# Altium footprint library FootPrintLib_11.PcbLib: 376 footprints (part 23 of 24)
Each footprint in its own frame and in the unit in brackets; x right, y up, seen from the top. Pads: shape width x height; smd on the part's side, far side on the other; paste and mask are expansions set on the pad; w line width, h text height; cw(c..) or ccw(c..) is an arc to the next point about the centre after c.
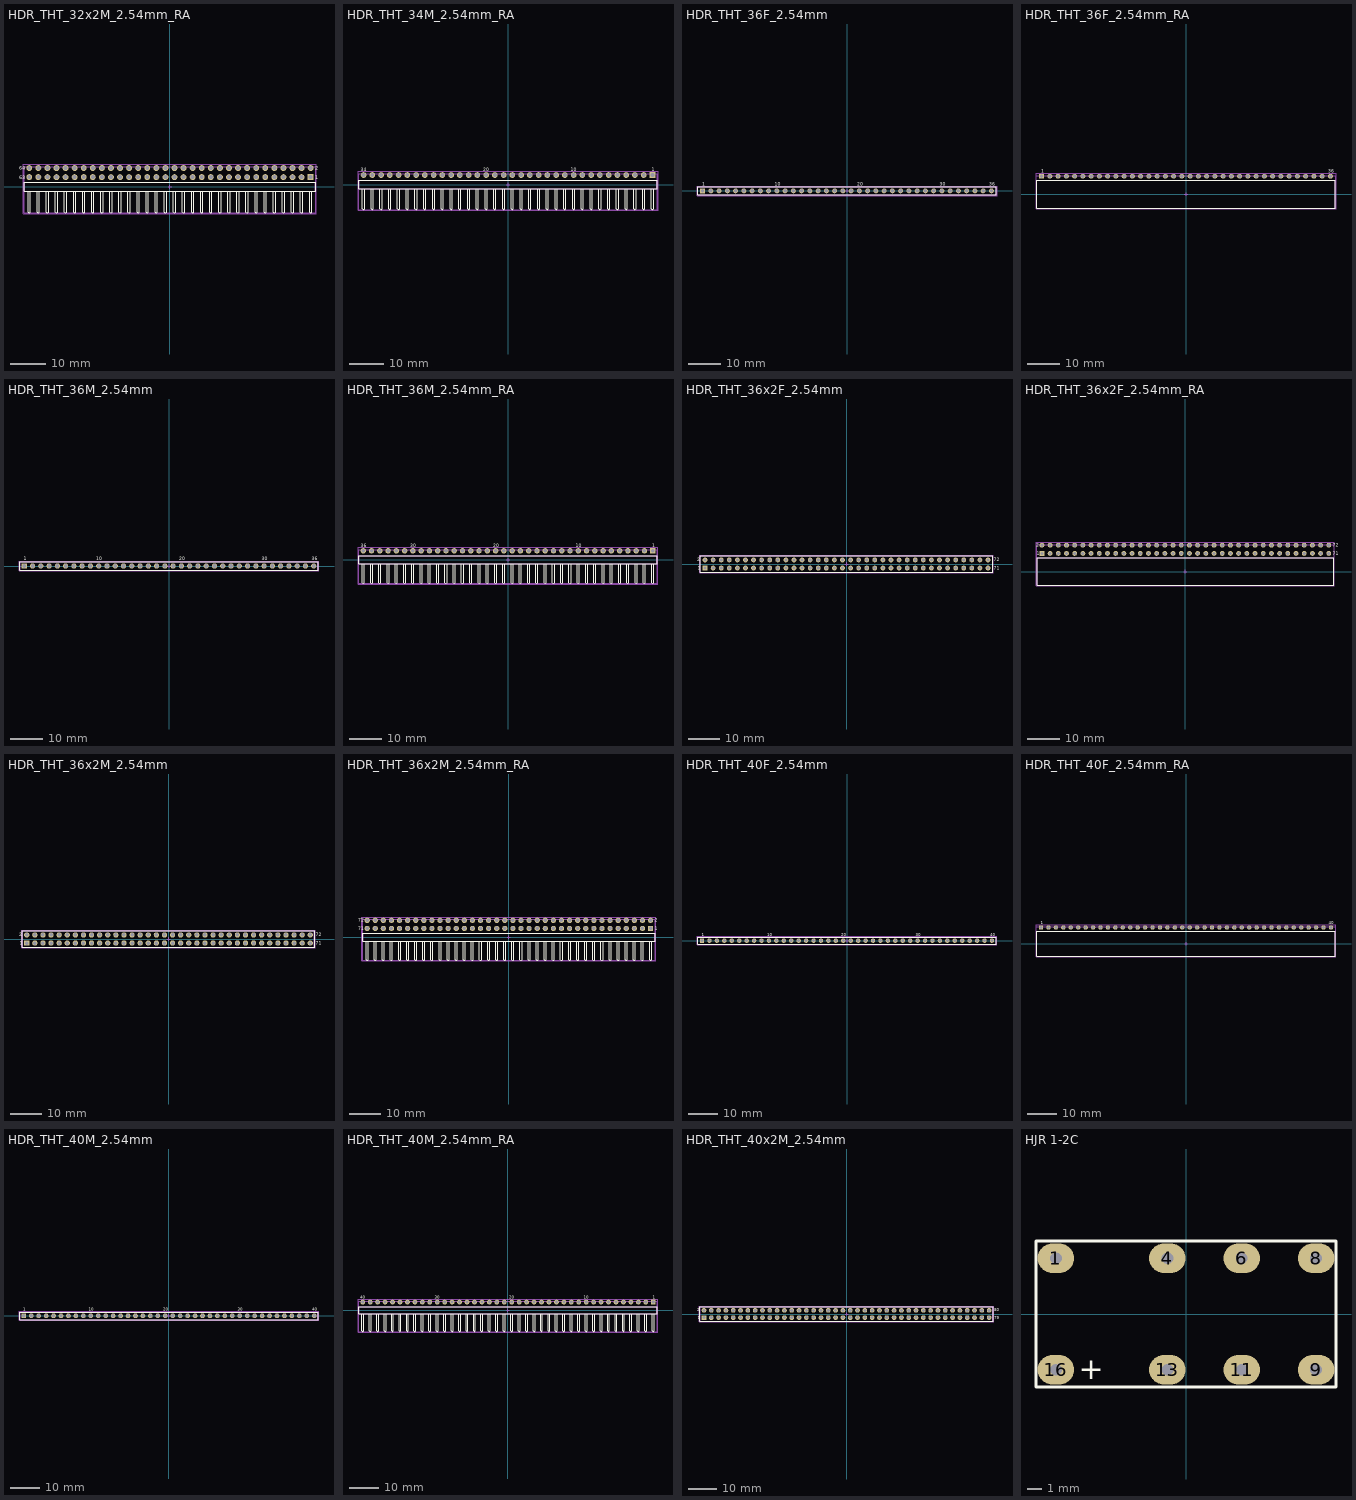
[diagram p22: the footprints below, top view; thin cyan lines are the x and y axes]

## HDR_THT_32x2M_2.54mm_RA [mm] "Pin Header, pitch 2.54 mm, THT, Angled, dual row, 64p"
height 5.08
pads (64):
  rect 1.65x1.65 hole 1.1: 1(39.37,2.73)
  round 1.65 hole 1.1: 2(39.37,5.27) 3(36.83,2.73) 4(36.83,5.27) 5(34.29,2.73) 6(34.29,5.27) 7(31.75,2.73) 8(31.75,5.27) 9(29.21,2.73) 10(29.21,5.27) 11(26.67,2.73) 12(26.67,5.27) 13(24.13,2.73) 14(24.13,5.27) 15(21.59,2.73) 16(21.59,5.27) 17(19.05,2.73) 18(19.05,5.27) 19(16.51,2.73) 20(16.51,5.27) 21(13.97,2.73) 22(13.97,5.27) 23(11.43,2.73) 24(11.43,5.27) 25(8.89,2.73) 26(8.89,5.27) 27(6.35,2.73) 28(6.35,5.27) 29(3.81,2.73) 30(3.81,5.27) 31(1.27,2.73) 32(1.27,5.27) 33(-1.27,2.73) 34(-1.27,5.27) 35(-3.81,2.73) 36(-3.81,5.27) 37(-6.35,2.73) 38(-6.35,5.27) 39(-8.89,2.73) 40(-8.89,5.27) 41(-11.43,2.73) 42(-11.43,5.27) 43(-13.97,2.73) 44(-13.97,5.27) 45(-16.51,2.73) 46(-16.51,5.27) 47(-19.05,2.73) 48(-19.05,5.27) 49(-21.59,2.73) 50(-21.59,5.27) 51(-24.13,2.73) 52(-24.13,5.27) 53(-26.67,2.73) 54(-26.67,5.27) 55(-29.21,2.73) 56(-29.21,5.27) 57(-31.75,2.73) 58(-31.75,5.27) 59(-34.29,2.73) 60(-34.29,5.27) 61(-36.83,2.73) 62(-36.83,5.27) 63(-39.37,2.73) 64(-39.37,5.27)
Top Overlay:
  drawing of 164 lines, arcs and shapes, not listed
  text "1" at 40.7,2.2 h1
  text "2" at 40.7,4.8 h1
  text "63" at -42.24,2.2 h1
  text "64" at -42.24,4.8 h1
Mechanical 11:
  lines w0.1: -40.64,-1.27 -40.64,1.27 40.64,1.27 40.64,-1.27 -40.64,-1.27
Mechanical 13:
  lines w0.1: -40.79,-7.27 40.79,-7.27 40.79,5.63 -40.79,5.63 -40.79,-7.27
Mechanical 15:
  lines w0.1: -0.5,0 0.5,0 ; 0,-0.5 0,0.5 ; -40.99,-7.47 40.99,-7.47 40.99,6.295 -40.99,6.295 -40.99,-7.47
3D body "61306421021.stp": height 5.14, standoff -2.94, extent -40.64,-7.27 40.64,5.63

## HDR_THT_34M_2.54mm_RA [mm] "Pin Header, pitch 2.54 mm, THT, Angled, single row, 34p"
height 2.54
pads (34):
  rect 1.65x1.65 hole 1.1: 1(41.91,2.77)
  round 1.65 hole 1.1: 2(39.37,2.77) 3(36.83,2.77) 4(34.29,2.77) 5(31.75,2.77) 6(29.21,2.77) 7(26.67,2.77) 8(24.13,2.77) 9(21.59,2.77) 10(19.05,2.77) 11(16.51,2.77) 12(13.97,2.77) 13(11.43,2.77) 14(8.89,2.77) 15(6.35,2.77) 16(3.81,2.77) 17(1.27,2.77) 18(-1.27,2.77) 19(-3.81,2.77) 20(-6.35,2.77) 21(-8.89,2.77) 22(-11.43,2.77) 23(-13.97,2.77) 24(-16.51,2.77) 25(-19.05,2.77) 26(-21.59,2.77) 27(-24.13,2.77) 28(-26.67,2.77) 29(-29.21,2.77) 30(-31.75,2.77) 31(-34.29,2.77) 32(-36.83,2.77) 33(-39.37,2.77) 34(-41.91,2.77)
Top Overlay:
  lines w0.15: -42.23,-1.27 -42.23,-7.07 -41.91,-7.27 -41.59,-7.07 -41.59,-1.27 ; -39.69,-1.27 -39.69,-7.07 -39.37,-7.27 -39.05,-7.07 -39.05,-1.27 ; -37.15,-1.27 -37.15,-7.07 -36.83,-7.27 -36.51,-7.07 -36.51,-1.27 ; -34.61,-1.27 -34.61,-7.07 -34.29,-7.27 -33.97,-7.07 -33.97,-1.27 ; -32.07,-1.27 -32.07,-7.07 -31.75,-7.27 -31.43,-7.07 -31.43,-1.27 ; -29.53,-1.27 -29.53,-7.07 -29.21,-7.27 -28.89,-7.07 -28.89,-1.27 ; -26.99,-1.27 -26.99,-7.07 -26.67,-7.27 -26.35,-7.07 -26.35,-1.27 ; -24.45,-1.27 -24.45,-7.07 -24.13,-7.27 -23.81,-7.07 -23.81,-1.27 ; -21.91,-1.27 -21.91,-7.07 -21.59,-7.27 -21.27,-7.07 -21.27,-1.27 ; -19.37,-1.27 -19.37,-7.07 -19.05,-7.27 -18.73,-7.07 -18.73,-1.27 ; -16.83,-1.27 -16.83,-7.07 -16.51,-7.27 -16.19,-7.07 -16.19,-1.27 ; -14.29,-1.27 -14.29,-7.07 -13.97,-7.27 -13.65,-7.07 -13.65,-1.27 ; -11.75,-1.27 -11.75,-7.07 -11.43,-7.27 -11.11,-7.07 -11.11,-1.27 ; -9.21,-1.27 -9.21,-7.07 -8.89,-7.27 -8.57,-7.07 -8.57,-1.27 ; -6.67,-1.27 -6.67,-7.07 -6.35,-7.27 -6.03,-7.07 -6.03,-1.27 ; -4.13,-1.27 -4.13,-7.07 -3.81,-7.27 -3.49,-7.07 -3.49,-1.27 ; -1.59,-1.27 -1.59,-7.07 -1.27,-7.27 -0.95,-7.07 -0.95,-1.27 ; 0.95,-1.27 0.95,-7.07 1.27,-7.27 1.59,-7.07 1.59,-1.27 ; 3.49,-1.27 3.49,-7.07 3.81,-7.27 4.13,-7.07 4.13,-1.27 ; 6.03,-1.27 6.03,-7.07 6.35,-7.27 6.67,-7.07 6.67,-1.27 ; 8.57,-1.27 8.57,-7.07 8.89,-7.27 9.21,-7.07 9.21,-1.27 ; 11.11,-1.27 11.11,-7.07 11.43,-7.27 11.75,-7.07 11.75,-1.27 ; 13.65,-1.27 13.65,-7.07 13.97,-7.27 14.29,-7.07 14.29,-1.27 ; 16.19,-1.27 16.19,-7.07 16.51,-7.27 16.83,-7.07 16.83,-1.27 ; 18.73,-1.27 18.73,-7.07 19.05,-7.27 19.37,-7.07 19.37,-1.27 ; 21.27,-1.27 21.27,-7.07 21.59,-7.27 21.91,-7.07 21.91,-1.27 ; 23.81,-1.27 23.81,-7.07 24.13,-7.27 24.45,-7.07 24.45,-1.27 ; 26.35,-1.27 26.35,-7.07 26.67,-7.27 26.99,-7.07 26.99,-1.27 ; 28.89,-1.27 28.89,-7.07 29.21,-7.27 29.53,-7.07 29.53,-1.27 ; 31.43,-1.27 31.43,-7.07 31.75,-7.27 32.07,-7.07 32.07,-1.27 ; 33.97,-1.27 33.97,-7.07 34.29,-7.27 34.61,-7.07 34.61,-1.27 ; 36.51,-1.27 36.51,-7.07 36.83,-7.27 37.15,-7.07 37.15,-1.27 ; 39.05,-1.27 39.05,-7.07 39.37,-7.27 39.69,-7.07 39.69,-1.27 ; 41.59,-1.27 41.59,-7.07 41.91,-7.27 42.23,-7.07 42.23,-1.27
  lines w0.2: -43.33,-1.27 -43.33,1.27 43.33,1.27 43.33,-1.27 -43.33,-1.27
  text "34" at -42.68,3.9 h1
  text "20" at -7.12,3.9 h1
  text "1" at 41.74,3.9 h1
  text "10" at 18.28,3.9 h1
Mechanical 11:
  lines w0.1: -43.18,-1.27 -43.18,1.27 43.18,1.27 43.18,-1.27 -43.18,-1.27
Mechanical 13:
  lines w0.1: -43.33,-7.27 -43.33,3.09 43.33,3.09 43.33,-7.27 -43.33,-7.27
Mechanical 15:
  lines w0.1: -0.5,0 0.5,0 ; 0,-0.5 0,0.5 ; -43.53,-7.47 43.53,-7.47 43.53,3.795 -43.53,3.795 -43.53,-7.47
3D body "61303411021.stp": height 2.62, standoff -2.92, extent -43.18,-7.27 43.18,3.09

## HDR_THT_36F_2.54mm [mm] "Socket Header, Pitch 2.54 mm, THT, Vertical, single row, 36p"
height 8.5
pads (36):
  rect 1.5x1.5 hole 1.02: 1(-44.45,0)
  round 1.5 hole 1.02: 2(-41.91,0) 3(-39.37,0) 4(-36.83,0) 5(-34.29,0) 6(-31.75,0) 7(-29.21,0) 8(-26.67,0) 9(-24.13,0) 10(-21.59,0) 11(-19.05,0) 12(-16.51,0) 13(-13.97,0) 14(-11.43,0) 15(-8.89,0) 16(-6.35,0) 17(-3.81,0) 18(-1.27,0) 19(1.27,0) 20(3.81,0) 21(6.35,0) 22(8.89,0) 23(11.43,0) 24(13.97,0) 25(16.51,0) 26(19.05,0) 27(21.59,0) 28(24.13,0) 29(26.67,0) 30(29.21,0) 31(31.75,0) 32(34.29,0) 33(36.83,0) 34(39.37,0) 35(41.91,0) 36(44.45,0)
Top Overlay:
  lines w0.2: -45.97,-1.25 45.97,-1.25 45.97,1.25 -45.97,1.25 -45.97,-1.25
  text "30" at 28.58,1.6 h1
  text "36" at 43.82,1.6 h1
  text "20" at 3.18,1.6 h1
  text "10" at -22.22,1.6 h1
  text "1" at -44.54,1.6 h1
Mechanical 11:
  lines w0.1: -45.97,-1.25 45.97,-1.25 45.97,1.25 -45.97,1.25 -45.97,-1.25
Mechanical 13:
  lines w0.1: -46.095,-1.25 -46.095,1.25 46.095,1.25 46.095,-1.25 -46.095,-1.25
Mechanical 15:
  lines w0.1: -0.5,0 0.5,0 ; 0,-0.5 0,0.5 ; -46.17,-1.45 -46.17,1.45 46.17,1.45 46.17,-1.45 -46.17,-1.45
3D body "61303611821.stp": height 8.55, standoff -3.06, extent -45.97,-1.25 45.97,1.25

## HDR_THT_36F_2.54mm_RA [mm] "Socket Header, Pitch 2.54 mm, THT, Angled, single row, 36p"
height 2.5
pads (36):
  rect 1.5x1.5 hole 1.02: 1(-44.45,5.55)
  round 1.5 hole 1.02: 2(-41.91,5.55) 3(-39.37,5.55) 4(-36.83,5.55) 5(-34.29,5.55) 6(-31.75,5.55) 7(-29.21,5.55) 8(-26.67,5.55) 9(-24.13,5.55) 10(-21.59,5.55) 11(-19.05,5.55) 12(-16.51,5.55) 13(-13.97,5.55) 14(-11.43,5.55) 15(-8.89,5.55) 16(-6.35,5.55) 17(-3.81,5.55) 18(-1.27,5.55) 19(1.27,5.55) 20(3.81,5.55) 21(6.35,5.55) 22(8.89,5.55) 23(11.43,5.55) 24(13.97,5.55) 25(16.51,5.55) 26(19.05,5.55) 27(21.59,5.55) 28(24.13,5.55) 29(26.67,5.55) 30(29.21,5.55) 31(31.75,5.55) 32(34.29,5.55) 33(36.83,5.55) 34(39.37,5.55) 35(41.91,5.55) 36(44.45,5.55)
Top Overlay:
  lines w0.2: -45.97,-4.25 45.97,-4.25 45.97,4.25 -45.97,4.25 -45.97,-4.25
  text "36" at 43.71,6.7 h1
  text "1" at -44.61,6.7 h1
Mechanical 11:
  lines w0.1: -45.97,-4.25 -45.97,4.25 45.97,4.25 45.97,-4.25 -45.97,-4.25
Mechanical 13:
  lines w0.1: -46.095,-4.25 46.095,-4.25 46.095,5.75 -46.095,5.75 -46.095,-4.25
Mechanical 15:
  lines w0.1: -0.5,0 0.5,0 ; 0,-0.5 0,0.5 ; -46.17,-4.45 46.17,-4.45 46.17,6.5 -46.17,6.5 -46.17,-4.45
3D body "613036143121.stp": height 2.55, standoff -3.04, extent -45.97,-4.25 45.97,5.75

## HDR_THT_36M_2.54mm [mm] "Pin Header, pitch 2.54 mm, THT, Vertical, single row, 36p"
height 8.54
pads (36):
  rect 1.6x1.6 hole 1.1: 1(-44.45,0)
  round 1.6 hole 1.1: 2(-41.91,0) 3(-39.37,0) 4(-36.83,0) 5(-34.29,0) 6(-31.75,0) 7(-29.21,0) 8(-26.67,0) 9(-24.13,0) 10(-21.59,0) 11(-19.05,0) 12(-16.51,0) 13(-13.97,0) 14(-11.43,0) 15(-8.89,0) 16(-6.35,0) 17(-3.81,0) 18(-1.27,0) 19(1.27,0) 20(3.81,0) 21(6.35,0) 22(8.89,0) 23(11.43,0) 24(13.97,0) 25(16.51,0) 26(19.05,0) 27(21.59,0) 28(24.13,0) 29(26.67,0) 30(29.21,0) 31(31.75,0) 32(34.29,0) 33(36.83,0) 34(39.37,0) 35(41.91,0) 36(44.45,0)
Top Overlay:
  lines w0.2: -45.87,-1.27 -45.87,1.27 45.87,1.27 45.87,-1.27 -45.87,-1.27
  text "36" at 43.82,1.7 h1
  text "20" at 3.1,1.7 h1
  text "1" at -44.64,1.7 h1
  text "10" at -22.3,1.7 h1
  text "30" at 28.5,1.7 h1
Mechanical 11:
  lines w0.1: -45.72,-1.27 45.72,-1.27 45.72,1.27 -45.72,1.27 -45.72,-1.27
Mechanical 13:
  lines w0.1: -45.87,-1.27 -45.87,1.27 45.87,1.27 45.87,-1.27 -45.87,-1.27
Mechanical 15:
  lines w0.1: -0.5,0 0.5,0 ; 0,-0.5 0,0.5 ; -46.07,-1.47 -46.07,1.47 46.07,1.47 46.07,-1.47 -46.07,-1.47
3D body "61303611121.stp": height 8.57, standoff -2.97, extent -45.72,-1.27 45.72,1.27

## HDR_THT_36M_2.54mm_RA [mm] "Pin Header, pitch 2.54 mm, THT, Angled, single row, 36p"
height 2.54
pads (36):
  rect 1.65x1.65 hole 1.1: 1(44.45,2.77)
  round 1.65 hole 1.1: 2(41.91,2.77) 3(39.37,2.77) 4(36.83,2.77) 5(34.29,2.77) 6(31.75,2.77) 7(29.21,2.77) 8(26.67,2.77) 9(24.13,2.77) 10(21.59,2.77) 11(19.05,2.77) 12(16.51,2.77) 13(13.97,2.77) 14(11.43,2.77) 15(8.89,2.77) 16(6.35,2.77) 17(3.81,2.77) 18(1.27,2.77) 19(-1.27,2.77) 20(-3.81,2.77) 21(-6.35,2.77) 22(-8.89,2.77) 23(-11.43,2.77) 24(-13.97,2.77) 25(-16.51,2.77) 26(-19.05,2.77) 27(-21.59,2.77) 28(-24.13,2.77) 29(-26.67,2.77) 30(-29.21,2.77) 31(-31.75,2.77) 32(-34.29,2.77) 33(-36.83,2.77) 34(-39.37,2.77) 35(-41.91,2.77) 36(-44.45,2.77)
Top Overlay:
  lines w0.15: -44.77,-1.27 -44.77,-7.07 -44.45,-7.27 -44.13,-7.07 -44.13,-1.27 ; -42.23,-1.27 -42.23,-7.07 -41.91,-7.27 -41.59,-7.07 -41.59,-1.27 ; -39.69,-1.27 -39.69,-7.07 -39.37,-7.27 -39.05,-7.07 -39.05,-1.27 ; -37.15,-1.27 -37.15,-7.07 -36.83,-7.27 -36.51,-7.07 -36.51,-1.27 ; -34.61,-1.27 -34.61,-7.07 -34.29,-7.27 -33.97,-7.07 -33.97,-1.27 ; -32.07,-1.27 -32.07,-7.07 -31.75,-7.27 -31.43,-7.07 -31.43,-1.27 ; -29.53,-1.27 -29.53,-7.07 -29.21,-7.27 -28.89,-7.07 -28.89,-1.27 ; -26.99,-1.27 -26.99,-7.07 -26.67,-7.27 -26.35,-7.07 -26.35,-1.27 ; -24.45,-1.27 -24.45,-7.07 -24.13,-7.27 -23.81,-7.07 -23.81,-1.27 ; -21.91,-1.27 -21.91,-7.07 -21.59,-7.27 -21.27,-7.07 -21.27,-1.27 ; -19.37,-1.27 -19.37,-7.07 -19.05,-7.27 -18.73,-7.07 -18.73,-1.27 ; -16.83,-1.27 -16.83,-7.07 -16.51,-7.27 -16.19,-7.07 -16.19,-1.27 ; -14.29,-1.27 -14.29,-7.07 -13.97,-7.27 -13.65,-7.07 -13.65,-1.27 ; -11.75,-1.27 -11.75,-7.07 -11.43,-7.27 -11.11,-7.07 -11.11,-1.27 ; -9.21,-1.27 -9.21,-7.07 -8.89,-7.27 -8.57,-7.07 -8.57,-1.27 ; -6.67,-1.27 -6.67,-7.07 -6.35,-7.27 -6.03,-7.07 -6.03,-1.27 ; -4.13,-1.27 -4.13,-7.07 -3.81,-7.27 -3.49,-7.07 -3.49,-1.27 ; -1.59,-1.27 -1.59,-7.07 -1.27,-7.27 -0.95,-7.07 -0.95,-1.27 ; 0.95,-1.27 0.95,-7.07 1.27,-7.27 1.59,-7.07 1.59,-1.27 ; 3.49,-1.27 3.49,-7.07 3.81,-7.27 4.13,-7.07 4.13,-1.27 ; 6.03,-1.27 6.03,-7.07 6.35,-7.27 6.67,-7.07 6.67,-1.27 ; 8.57,-1.27 8.57,-7.07 8.89,-7.27 9.21,-7.07 9.21,-1.27 ; 11.11,-1.27 11.11,-7.07 11.43,-7.27 11.75,-7.07 11.75,-1.27 ; 13.65,-1.27 13.65,-7.07 13.97,-7.27 14.29,-7.07 14.29,-1.27 ; 16.19,-1.27 16.19,-7.07 16.51,-7.27 16.83,-7.07 16.83,-1.27 ; 18.73,-1.27 18.73,-7.07 19.05,-7.27 19.37,-7.07 19.37,-1.27 ; 21.27,-1.27 21.27,-7.07 21.59,-7.27 21.91,-7.07 21.91,-1.27 ; 23.81,-1.27 23.81,-7.07 24.13,-7.27 24.45,-7.07 24.45,-1.27 ; 26.35,-1.27 26.35,-7.07 26.67,-7.27 26.99,-7.07 26.99,-1.27 ; 28.89,-1.27 28.89,-7.07 29.21,-7.27 29.53,-7.07 29.53,-1.27 ; 31.43,-1.27 31.43,-7.07 31.75,-7.27 32.07,-7.07 32.07,-1.27 ; 33.97,-1.27 33.97,-7.07 34.29,-7.27 34.61,-7.07 34.61,-1.27 ; 36.51,-1.27 36.51,-7.07 36.83,-7.27 37.15,-7.07 37.15,-1.27 ; 39.05,-1.27 39.05,-7.07 39.37,-7.27 39.69,-7.07 39.69,-1.27 ; 41.59,-1.27 41.59,-7.07 41.91,-7.27 42.23,-7.07 42.23,-1.27 ; 44.13,-1.27 44.13,-7.07 44.45,-7.27 44.77,-7.07 44.77,-1.27
  lines w0.2: -45.87,-1.27 45.87,-1.27 45.87,1.27 -45.87,1.27 -45.87,-1.27
  text "10" at 20.82,3.9 h1
  text "1" at 44.28,3.9 h1
  text "20" at -4.58,3.9 h1
  text "36" at -45.22,3.9 h1
  text "30" at -29.98,3.9 h1
Mechanical 11:
  lines w0.1: -45.72,-1.27 45.72,-1.27 45.72,1.27 -45.72,1.27 -45.72,-1.27
Mechanical 13:
  lines w0.1: -45.87,-7.27 45.87,-7.27 45.87,3.09 -45.87,3.09 -45.87,-7.27
Mechanical 15:
  lines w0.1: -0.5,0 0.5,0 ; 0,-0.5 0,0.5 ; -46.07,-7.47 -46.07,3.795 46.07,3.795 46.07,-7.47 -46.07,-7.47
3D body "61303611021.stp": height 2.62, standoff -2.92, extent -45.72,-7.27 45.72,3.09

## HDR_THT_36x2F_2.54mm [mm] "Socket Header, Pitch 2.54 mm, THT, Vertical, dual row, 72p"
height 8.4
pads (72):
  rect 1.5x1.5 hole 1.02: 1(-44.45,-1.27)
  round 1.5 hole 1.02: 2(-44.45,1.27) 3(-41.91,-1.27) 4(-41.91,1.27) 5(-39.37,-1.27) 6(-39.37,1.27) 7(-36.83,-1.27) 8(-36.83,1.27) 9(-34.29,-1.27) 10(-34.29,1.27) 11(-31.75,-1.27) 12(-31.75,1.27) 13(-29.21,-1.27) 14(-29.21,1.27) 15(-26.67,-1.27) 16(-26.67,1.27) 17(-24.13,-1.27) 18(-24.13,1.27) 19(-21.59,-1.27) 20(-21.59,1.27) 21(-19.05,-1.27) 22(-19.05,1.27) 23(-16.51,-1.27) 24(-16.51,1.27) 25(-13.97,-1.27) 26(-13.97,1.27) 27(-11.43,-1.27) 28(-11.43,1.27) 29(-8.89,-1.27) 30(-8.89,1.27) 31(-6.35,-1.27) 32(-6.35,1.27) 33(-3.81,-1.27) 34(-3.81,1.27) 35(-1.27,-1.27) 36(-1.27,1.27) 37(1.27,-1.27) 38(1.27,1.27) 39(3.81,-1.27) 40(3.81,1.27) 41(6.35,-1.27) 42(6.35,1.27) 43(8.89,-1.27) 44(8.89,1.27) 45(11.43,-1.27) 46(11.43,1.27) 47(13.97,-1.27) 48(13.97,1.27) 49(16.51,-1.27) 50(16.51,1.27) 51(19.05,-1.27) 52(19.05,1.27) 53(21.59,-1.27) 54(21.59,1.27) 55(24.13,-1.27) 56(24.13,1.27) 57(26.67,-1.27) 58(26.67,1.27) 59(29.21,-1.27) 60(29.21,1.27) 61(31.75,-1.27) 62(31.75,1.27) 63(34.29,-1.27) 64(34.29,1.27) 65(36.83,-1.27) 66(36.83,1.27) 67(39.37,-1.27) 68(39.37,1.27) 69(41.91,-1.27) 70(41.91,1.27) 71(44.45,-1.27) 72(44.45,1.27)
Top Overlay:
  lines w0.2: -45.97,-2.54 45.97,-2.54 45.97,2.54 -45.97,2.54 -45.97,-2.54
  text "1" at -46.68,-1.8 h1
  text "2" at -46.98,0.8 h1
  text "71" at 46.28,-1.8 h1
  text "72" at 46.28,0.8 h1
Mechanical 11:
  lines w0.1: -45.97,-2.54 -45.97,2.54 45.97,2.54 45.97,-2.54 -45.97,-2.54
Mechanical 13:
  lines w0.1: -46.095,-2.54 46.095,-2.54 46.095,2.54 -46.095,2.54 -46.095,-2.54
Mechanical 15:
  lines w0.1: -0.5,0 0.5,0 ; 0,-0.5 0,0.5 ; -46.17,-2.74 46.17,-2.74 46.17,2.74 -46.17,2.74 -46.17,-2.74
3D body "61307221821.stp": height 8.45, standoff -3.05, extent -45.97,-2.54 45.97,2.54

## HDR_THT_36x2F_2.54mm_RA [mm] "Socket Header, Pitch 2.54 mm, THT, Angled, dual row, 72p"
height 5.08
pads (72):
  rect 1.5x1.5 hole 1.02: 1(-44.45,5.61)
  round 1.5 hole 1.02: 2(-44.45,8.15) 3(-41.91,5.61) 4(-41.91,8.15) 5(-39.37,5.61) 6(-39.37,8.15) 7(-36.83,5.61) 8(-36.83,8.15) 9(-34.29,5.61) 10(-34.29,8.15) 11(-31.75,5.61) 12(-31.75,8.15) 13(-29.21,5.61) 14(-29.21,8.15) 15(-26.67,5.61) 16(-26.67,8.15) 17(-24.13,5.61) 18(-24.13,8.15) 19(-21.59,5.61) 20(-21.59,8.15) 21(-19.05,5.61) 22(-19.05,8.15) 23(-16.51,5.61) 24(-16.51,8.15) 25(-13.97,5.61) 26(-13.97,8.15) 27(-11.43,5.61) 28(-11.43,8.15) 29(-8.89,5.61) 30(-8.89,8.15) 31(-6.35,5.61) 32(-6.35,8.15) 33(-3.81,5.61) 34(-3.81,8.15) 35(-1.27,5.61) 36(-1.27,8.15) 37(1.27,5.61) 38(1.27,8.15) 39(3.81,5.61) 40(3.81,8.15) 41(6.35,5.61) 42(6.35,8.15) 43(8.89,5.61) 44(8.89,8.15) 45(11.43,5.61) 46(11.43,8.15) 47(13.97,5.61) 48(13.97,8.15) 49(16.51,5.61) 50(16.51,8.15) 51(19.05,5.61) 52(19.05,8.15) 53(21.59,5.61) 54(21.59,8.15) 55(24.13,5.61) 56(24.13,8.15) 57(26.67,5.61) 58(26.67,8.15) 59(29.21,5.61) 60(29.21,8.15) 61(31.75,5.61) 62(31.75,8.15) 63(34.29,5.61) 64(34.29,8.15) 65(36.83,5.61) 66(36.83,8.15) 67(39.37,5.61) 68(39.37,8.15) 69(41.91,5.61) 70(41.91,8.15) 71(44.45,5.61) 72(44.45,8.15)
Top Overlay:
  lines w0.2: -45.97,-4.25 45.97,-4.25 45.97,4.25 -45.97,4.25 -45.97,-4.25
  text "72" at 45.68,7.6 h1
  text "71" at 45.68,5.1 h1
  text "1" at -46.08,5.1 h1
  text "2" at -46.28,7.6 h1
Mechanical 11:
  lines w0.1: -45.97,-4.25 -45.97,4.25 45.97,4.25 45.97,-4.25 -45.97,-4.25
Mechanical 13:
  lines w0.1: -46.12,-4.25 -46.12,8.35 46.12,8.35 46.12,-4.25 -46.12,-4.25
Mechanical 15:
  lines w0.1: -0.5,0 0.5,0 ; 0,-0.5 0,0.5 ; -46.17,-4.45 -46.17,9.1 46.17,9.1 46.17,-4.45 -46.17,-4.45
3D body "613072243121.stp": height 5.05, standoff -3.25, extent -45.97,-4.25 45.97,8.35

## HDR_THT_36x2M_2.54mm [mm] "Pin Header, pitch 2.54 mm, THT, Vertical, dual row, 72p"
height 8.54
pads (72):
  rect 1.65x1.65 hole 1.1: 1(-44.45,-1.27)
  round 1.65 hole 1.1: 2(-44.45,1.27) 3(-41.91,-1.27) 4(-41.91,1.27) 5(-39.37,-1.27) 6(-39.37,1.27) 7(-36.83,-1.27) 8(-36.83,1.27) 9(-34.29,-1.27) 10(-34.29,1.27) 11(-31.75,-1.27) 12(-31.75,1.27) 13(-29.21,-1.27) 14(-29.21,1.27) 15(-26.67,-1.27) 16(-26.67,1.27) 17(-24.13,-1.27) 18(-24.13,1.27) 19(-21.59,-1.27) 20(-21.59,1.27) 21(-19.05,-1.27) 22(-19.05,1.27) 23(-16.51,-1.27) 24(-16.51,1.27) 25(-13.97,-1.27) 26(-13.97,1.27) 27(-11.43,-1.27) 28(-11.43,1.27) 29(-8.89,-1.27) 30(-8.89,1.27) 31(-6.35,-1.27) 32(-6.35,1.27) 33(-3.81,-1.27) 34(-3.81,1.27) 35(-1.27,-1.27) 36(-1.27,1.27) 37(1.27,-1.27) 38(1.27,1.27) 39(3.81,-1.27) 40(3.81,1.27) 41(6.35,-1.27) 42(6.35,1.27) 43(8.89,-1.27) 44(8.89,1.27) 45(11.43,-1.27) 46(11.43,1.27) 47(13.97,-1.27) 48(13.97,1.27) 49(16.51,-1.27) 50(16.51,1.27) 51(19.05,-1.27) 52(19.05,1.27) 53(21.59,-1.27) 54(21.59,1.27) 55(24.13,-1.27) 56(24.13,1.27) 57(26.67,-1.27) 58(26.67,1.27) 59(29.21,-1.27) 60(29.21,1.27) 61(31.75,-1.27) 62(31.75,1.27) 63(34.29,-1.27) 64(34.29,1.27) 65(36.83,-1.27) 66(36.83,1.27) 67(39.37,-1.27) 68(39.37,1.27) 69(41.91,-1.27) 70(41.91,1.27) 71(44.45,-1.27) 72(44.45,1.27)
Top Overlay:
  lines w0.2: -45.87,-2.54 -45.87,2.54 45.87,2.54 45.87,-2.54 -45.87,-2.54
  text "72" at 46.18,0.9 h1
  text "71" at 46.18,-1.8 h1
  text "2" at -46.88,0.9 h1
  text "1" at -46.58,-1.8 h1
Mechanical 11:
  lines w0.1: -45.72,-2.54 -45.72,2.54 45.72,2.54 45.72,-2.54 -45.72,-2.54
Mechanical 13:
  lines w0.1: -45.87,-2.54 -45.87,2.54 45.87,2.54 45.87,-2.54 -45.87,-2.54
Mechanical 15:
  lines w0.1: -0.5,0 0.5,0 ; 0,-0.5 0,0.5 ; -46.07,-2.74 -46.07,2.74 46.07,2.74 46.07,-2.74 -46.07,-2.74
3D body "61307221121.stp": height 8.59, standoff -2.95, extent -45.72,-2.54 45.72,2.54

## HDR_THT_36x2M_2.54mm_RA [mm] "Pin Header, pitch 2.54 mm, THT, Angled, dual row, 72p"
height 5.08
pads (72):
  rect 1.65x1.65 hole 1.1: 1(44.45,2.73)
  round 1.65 hole 1.1: 2(44.45,5.27) 3(41.91,2.73) 4(41.91,5.27) 5(39.37,2.73) 6(39.37,5.27) 7(36.83,2.73) 8(36.83,5.27) 9(34.29,2.73) 10(34.29,5.27) 11(31.75,2.73) 12(31.75,5.27) 13(29.21,2.73) 14(29.21,5.27) 15(26.67,2.73) 16(26.67,5.27) 17(24.13,2.73) 18(24.13,5.27) 19(21.59,2.73) 20(21.59,5.27) 21(19.05,2.73) 22(19.05,5.27) 23(16.51,2.73) 24(16.51,5.27) 25(13.97,2.73) 26(13.97,5.27) 27(11.43,2.73) 28(11.43,5.27) 29(8.89,2.73) 30(8.89,5.27) 31(6.35,2.73) 32(6.35,5.27) 33(3.81,2.73) 34(3.81,5.27) 35(1.27,2.73) 36(1.27,5.27) 37(-1.27,2.73) 38(-1.27,5.27) 39(-3.81,2.73) 40(-3.81,5.27) 41(-6.35,2.73) 42(-6.35,5.27) 43(-8.89,2.73) 44(-8.89,5.27) 45(-11.43,2.73) 46(-11.43,5.27) 47(-13.97,2.73) 48(-13.97,5.27) 49(-16.51,2.73) 50(-16.51,5.27) 51(-19.05,2.73) 52(-19.05,5.27) 53(-21.59,2.73) 54(-21.59,5.27) 55(-24.13,2.73) 56(-24.13,5.27) 57(-26.67,2.73) 58(-26.67,5.27) 59(-29.21,2.73) 60(-29.21,5.27) 61(-31.75,2.73) 62(-31.75,5.27) 63(-34.29,2.73) 64(-34.29,5.27) 65(-36.83,2.73) 66(-36.83,5.27) 67(-39.37,2.73) 68(-39.37,5.27) 69(-41.91,2.73) 70(-41.91,5.27) 71(-44.45,2.73) 72(-44.45,5.27)
Top Overlay:
  drawing of 184 lines, arcs and shapes, not listed
  text "2" at 45.78,4.8 h1
  text "1" at 45.78,2.2 h1
  text "71" at -47.32,2.2 h1
  text "72" at -47.32,4.8 h1
Mechanical 11:
  lines w0.1: -45.72,-1.27 45.72,-1.27 45.72,1.27 -45.72,1.27 -45.72,-1.27
Mechanical 13:
  lines w0.1: -45.87,-7.27 -45.87,5.63 45.87,5.63 45.87,-7.27 -45.87,-7.27
Mechanical 15:
  lines w0.1: -0.5,0 0.5,0 ; 0,-0.5 0,0.5 ; -46.07,-7.47 -46.07,6.295 46.07,6.295 46.07,-7.47 -46.07,-7.47
3D body "61307221021.stp": height 5.14, standoff -2.94, extent -45.72,-7.27 45.72,5.63

## HDR_THT_40F_2.54mm [mm] "Socket Header, Pitch 2.54 mm, THT, Vertical, single row, 40p"
height 8.5
pads (40):
  rect 1.5x1.5 hole 1.02: 1(-49.53,0)
  round 1.5 hole 1.02: 2(-46.99,0) 3(-44.45,0) 4(-41.91,0) 5(-39.37,0) 6(-36.83,0) 7(-34.29,0) 8(-31.75,0) 9(-29.21,0) 10(-26.67,0) 11(-24.13,0) 12(-21.59,0) 13(-19.05,0) 14(-16.51,0) 15(-13.97,0) 16(-11.43,0) 17(-8.89,0) 18(-6.35,0) 19(-3.81,0) 20(-1.27,0) 21(1.27,0) 22(3.81,0) 23(6.35,0) 24(8.89,0) 25(11.43,0) 26(13.97,0) 27(16.51,0) 28(19.05,0) 29(21.59,0) 30(24.13,0) 31(26.67,0) 32(29.21,0) 33(31.75,0) 34(34.29,0) 35(36.83,0) 36(39.37,0) 37(41.91,0) 38(44.45,0) 39(46.99,0) 40(49.53,0)
Top Overlay:
  lines w0.2: -51.05,-1.25 51.05,-1.25 51.05,1.25 -51.05,1.25 -51.05,-1.25
  text "40" at 48.9,1.6 h1
  text "30" at 23.5,1.6 h1
  text "20" at -1.9,1.6 h1
  text "10" at -27.3,1.6 h1
  text "1" at -49.62,1.6 h1
Mechanical 11:
  lines w0.1: -51.05,-1.25 51.05,-1.25 51.05,1.25 -51.05,1.25 -51.05,-1.25
Mechanical 13:
  lines w0.1: -51.175,-1.25 -51.175,1.25 51.175,1.25 51.175,-1.25 -51.175,-1.25
Mechanical 15:
  lines w0.1: -0.5,0 0.5,0 ; 0,-0.5 0,0.5 ; -51.25,-1.45 -51.25,1.45 51.25,1.45 51.25,-1.45 -51.25,-1.45
3D body "61304011821.stp": height 8.55, standoff -3.05, extent -51.05,-1.25 51.05,1.25

## HDR_THT_40F_2.54mm_RA [mm] "Socket Header, Pitch 2.54 mm, THT, Angled, single row, 40p"
height 2.5
pads (40):
  rect 1.5x1.5 hole 1.02: 1(-49.53,5.55)
  round 1.5 hole 1.02: 2(-46.99,5.55) 3(-44.45,5.55) 4(-41.91,5.55) 5(-39.37,5.55) 6(-36.83,5.55) 7(-34.29,5.55) 8(-31.75,5.55) 9(-29.21,5.55) 10(-26.67,5.55) 11(-24.13,5.55) 12(-21.59,5.55) 13(-19.05,5.55) 14(-16.51,5.55) 15(-13.97,5.55) 16(-11.43,5.55) 17(-8.89,5.55) 18(-6.35,5.55) 19(-3.81,5.55) 20(-1.27,5.55) 21(1.27,5.55) 22(3.81,5.55) 23(6.35,5.55) 24(8.89,5.55) 25(11.43,5.55) 26(13.97,5.55) 27(16.51,5.55) 28(19.05,5.55) 29(21.59,5.55) 30(24.13,5.55) 31(26.67,5.55) 32(29.21,5.55) 33(31.75,5.55) 34(34.29,5.55) 35(36.83,5.55) 36(39.37,5.55) 37(41.91,5.55) 38(44.45,5.55) 39(46.99,5.55) 40(49.53,5.55)
Top Overlay:
  lines w0.2: -51.05,-4.25 51.05,-4.25 51.05,4.25 -51.05,4.25 -51.05,-4.25
  text "40" at 48.79,6.7 h1
  text "1" at -49.69,6.7 h1
Mechanical 11:
  lines w0.1: -51.05,-4.25 -51.05,4.25 51.05,4.25 51.05,-4.25 -51.05,-4.25
Mechanical 13:
  lines w0.1: -51.175,-4.25 51.175,-4.25 51.175,5.75 -51.175,5.75 -51.175,-4.25
Mechanical 15:
  lines w0.1: -0.5,0 0.5,0 ; 0,-0.5 0,0.5 ; -51.25,-4.45 51.25,-4.45 51.25,6.5 -51.25,6.5 -51.25,-4.45
3D body "613040143121.stp": height 2.55, standoff -3.04, extent -51.05,-4.25 51.05,5.75

## HDR_THT_40M_2.54mm [mm] "Pin Header, pitch 2.54 mm, THT, Vertical, single row, 40p"
height 8.54
pads (40):
  rect 1.6x1.6 hole 1.1: 1(-49.53,0)
  round 1.6 hole 1.1: 2(-46.99,0) 3(-44.45,0) 4(-41.91,0) 5(-39.37,0) 6(-36.83,0) 7(-34.29,0) 8(-31.75,0) 9(-29.21,0) 10(-26.67,0) 11(-24.13,0) 12(-21.59,0) 13(-19.05,0) 14(-16.51,0) 15(-13.97,0) 16(-11.43,0) 17(-8.89,0) 18(-6.35,0) 19(-3.81,0) 20(-1.27,0) 21(1.27,0) 22(3.81,0) 23(6.35,0) 24(8.89,0) 25(11.43,0) 26(13.97,0) 27(16.51,0) 28(19.05,0) 29(21.59,0) 30(24.13,0) 31(26.67,0) 32(29.21,0) 33(31.75,0) 34(34.29,0) 35(36.83,0) 36(39.37,0) 37(41.91,0) 38(44.45,0) 39(46.99,0) 40(49.53,0)
Top Overlay:
  lines w0.2: -50.95,-1.27 50.95,-1.27 50.95,1.27 -50.95,1.27 -50.95,-1.27
  text "40" at 48.9,1.7 h1
  text "30" at 23.42,1.7 h1
  text "10" at -27.38,1.7 h1
  text "1" at -49.72,1.7 h1
  text "20" at -1.98,1.7 h1
Mechanical 11:
  lines w0.1: -50.8,-1.27 -50.8,1.27 50.8,1.27 50.8,-1.27 -50.8,-1.27
Mechanical 13:
  lines w0.1: -50.95,-1.27 50.95,-1.27 50.95,1.27 -50.95,1.27 -50.95,-1.27
Mechanical 15:
  lines w0.1: -0.5,0 0.5,0 ; 0,-0.5 0,0.5 ; -51.15,-1.47 51.15,-1.47 51.15,1.47 -51.15,1.47 -51.15,-1.47
3D body "61304011121.stp": height 8.57, standoff -2.97, extent -50.8,-1.27 50.8,1.27

## HDR_THT_40M_2.54mm_RA [mm] "Pin Header, pitch 2.54 mm, THT, Angled, single row, 40p"
height 2.54
pads (40):
  rect 1.65x1.65 hole 1.1: 1(49.53,2.77)
  round 1.65 hole 1.1: 2(46.99,2.77) 3(44.45,2.77) 4(41.91,2.77) 5(39.37,2.77) 6(36.83,2.77) 7(34.29,2.77) 8(31.75,2.77) 9(29.21,2.77) 10(26.67,2.77) 11(24.13,2.77) 12(21.59,2.77) 13(19.05,2.77) 14(16.51,2.77) 15(13.97,2.77) 16(11.43,2.77) 17(8.89,2.77) 18(6.35,2.77) 19(3.81,2.77) 20(1.27,2.77) 21(-1.27,2.77) 22(-3.81,2.77) 23(-6.35,2.77) 24(-8.89,2.77) 25(-11.43,2.77) 26(-13.97,2.77) 27(-16.51,2.77) 28(-19.05,2.77) 29(-21.59,2.77) 30(-24.13,2.77) 31(-26.67,2.77) 32(-29.21,2.77) 33(-31.75,2.77) 34(-34.29,2.77) 35(-36.83,2.77) 36(-39.37,2.77) 37(-41.91,2.77) 38(-44.45,2.77) 39(-46.99,2.77) 40(-49.53,2.77)
Top Overlay:
  drawing of 164 lines, arcs and shapes, not listed
  text "30" at -24.9,3.9 h1
  text "20" at 0.5,3.9 h1
  text "1" at 49.36,3.9 h1
  text "10" at 25.9,3.9 h1
  text "40" at -50.3,3.9 h1
Mechanical 11:
  lines w0.1: -50.8,-1.27 -50.8,1.27 50.8,1.27 50.8,-1.27 -50.8,-1.27
Mechanical 13:
  lines w0.1: -50.95,-7.27 50.95,-7.27 50.95,3.09 -50.95,3.09 -50.95,-7.27
Mechanical 15:
  lines w0.1: -0.5,0 0.5,0 ; 0,-0.5 0,0.5 ; -51.15,-7.47 51.15,-7.47 51.15,3.795 -51.15,3.795 -51.15,-7.47
3D body "61304011021.stp": height 2.62, standoff -2.92, extent -50.8,-7.27 50.8,3.09

## HDR_THT_40x2M_2.54mm [mm] "Pin Header, pitch 2.54 mm, THT, Vertical, dual row, 80p"
height 8.54
pads (80):
  rect 1.65x1.65 hole 1.1: 1(-49.53,-1.27)
  round 1.65 hole 1.1: 2(-49.53,1.27) 3(-46.99,-1.27) 4(-46.99,1.27) 5(-44.45,-1.27) 6(-44.45,1.27) 7(-41.91,-1.27) 8(-41.91,1.27) 9(-39.37,-1.27) 10(-39.37,1.27) 11(-36.83,-1.27) 12(-36.83,1.27) 13(-34.29,-1.27) 14(-34.29,1.27) 15(-31.75,-1.27) 16(-31.75,1.27) 17(-29.21,-1.27) 18(-29.21,1.27) 19(-26.67,-1.27) 20(-26.67,1.27) 21(-24.13,-1.27) 22(-24.13,1.27) 23(-21.59,-1.27) 24(-21.59,1.27) 25(-19.05,-1.27) 26(-19.05,1.27) 27(-16.51,-1.27) 28(-16.51,1.27) 29(-13.97,-1.27) 30(-13.97,1.27) 31(-11.43,-1.27) 32(-11.43,1.27) 33(-8.89,-1.27) 34(-8.89,1.27) 35(-6.35,-1.27) 36(-6.35,1.27) 37(-3.81,-1.27) 38(-3.81,1.27) 39(-1.27,-1.27) 40(-1.27,1.27) 41(1.27,-1.27) 42(1.27,1.27) 43(3.81,-1.27) 44(3.81,1.27) 45(6.35,-1.27) 46(6.35,1.27) 47(8.89,-1.27) 48(8.89,1.27) 49(11.43,-1.27) 50(11.43,1.27) 51(13.97,-1.27) 52(13.97,1.27) 53(16.51,-1.27) 54(16.51,1.27) 55(19.05,-1.27) 56(19.05,1.27) 57(21.59,-1.27) 58(21.59,1.27) 59(24.13,-1.27) 60(24.13,1.27) 61(26.67,-1.27) 62(26.67,1.27) 63(29.21,-1.27) 64(29.21,1.27) 65(31.75,-1.27) 66(31.75,1.27) 67(34.29,-1.27) 68(34.29,1.27) 69(36.83,-1.27) 70(36.83,1.27) 71(39.37,-1.27) 72(39.37,1.27) 73(41.91,-1.27) 74(41.91,1.27) 75(44.45,-1.27) 76(44.45,1.27) 77(46.99,-1.27) 78(46.99,1.27) 79(49.53,-1.27) 80(49.53,1.27)
Top Overlay:
  lines w0.2: -50.95,-2.54 -50.95,2.54 50.95,2.54 50.95,-2.54 -50.95,-2.54
  text "2" at -51.96,0.9 h1
  text "1" at -51.66,-1.8 h1
  text "79" at 51.26,-1.8 h1
  text "80" at 51.26,0.9 h1
Mechanical 11:
  lines w0.1: -50.8,-2.54 -50.8,2.54 50.8,2.54 50.8,-2.54 -50.8,-2.54
Mechanical 13:
  lines w0.1: -50.95,-2.54 -50.95,2.54 50.95,2.54 50.95,-2.54 -50.95,-2.54
Mechanical 15:
  lines w0.1: -0.5,0 0.5,0 ; 0,-0.5 0,0.5 ; -51.15,-2.74 -51.15,2.74 51.15,2.74 51.15,-2.74 -51.15,-2.74
3D body "61308021121.stp": height 8.59, standoff -2.95, extent -50.8,-2.54 50.8,2.54

## HJR 1-2C [mm]
height 11.8
pads (8):
  oval 2.5x2 hole 0.8: 1(-8.89,3.81) 4(-1.27,3.81) 6(3.81,3.81) 8(8.89,3.81) 9(8.89,-3.81) 11(3.81,-3.81) 13(-1.27,-3.81) 16(-8.89,-3.81)
Top Overlay:
  lines w0.2: -10.25,-5 -10.25,5 10.25,5 10.25,-5 -10.25,-5
  text "+" at -7.341,-4.445 h1.5